# Altium footprint library Terminal_Blocks_Pluggable PCB_5.08mm.PcbLib: 299 footprints (part 14 of 19)
Each footprint in its own frame and in the unit in brackets; x right, y up, seen from the top. Pads: shape width x height; smd on the part's side, far side on the other; paste and mask are expansions set on the pad; w line width, h text height; cw(c..) or ccw(c..) is an arc to the next point about the centre after c.
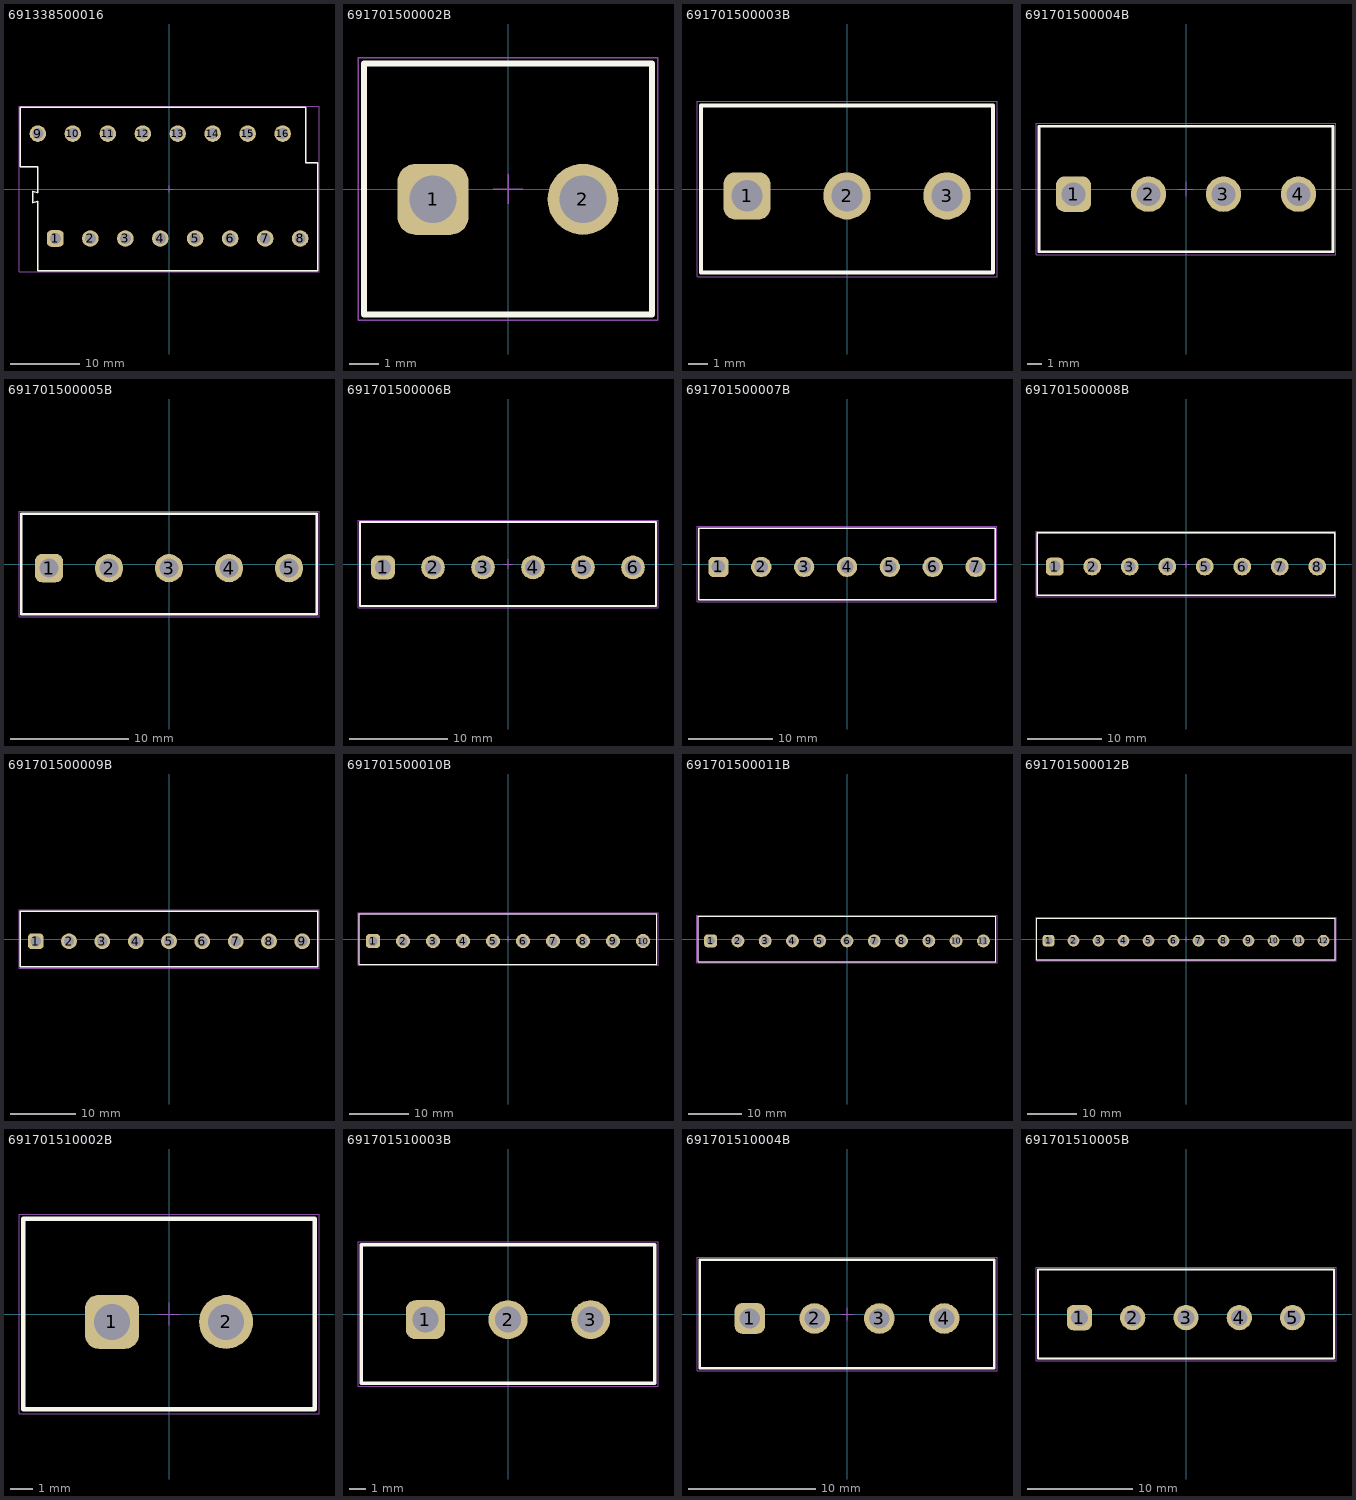
[diagram p13: the footprints below, top view; thin cyan lines are the x and y axes]

## 691338500016 [mm] "Double Level Vertical Male PCB Header, pitch 5.08mm, 16p"
height 22
pads (16):
  rrect50% 2.4x2.4 hole 1.6: 1(-16.51,-7.19)
  round 2.4 hole 1.6: 2(-11.43,-7.19) 3(-6.35,-7.19) 4(-1.27,-7.19) 5(3.81,-7.19) 6(8.89,-7.19) 7(13.97,-7.19) 8(19.05,-7.19) 9(-19.05,8.05) 10(-13.97,8.05) 11(-8.89,8.05) 12(-3.81,8.05) 13(1.27,8.05) 14(6.35,8.05) 15(11.43,8.05) 16(16.51,8.05)
Top Overlay:
  lines w0.2: -21.59,3.25 -21.59,11.85 19.85,11.85 19.85,3.8 21.59,3.8 21.59,-11.85 -19.05,-11.85 -19.05,-1.77 -19.8,-2.02 -19.8,-0.32 -19.05,-0.57 -19.05,3.25 -21.59,3.25
Top Designator:
  text ".Designator" at -7.498,-0.5 h1.5
Top Component Outline:
  lines w0.1: -21.59,3.25 -19.05,3.25 -19.05,-0.57 -19.8,-0.32 -19.8,-2.02 -19.05,-1.77 -19.05,-11.85 21.59,-11.85 21.59,3.8 19.85,3.8 19.85,11.85 -21.59,11.85 -21.59,3.25
Top 3D Body:
  lines w0.1: -21.59,3.25 -21.59,11.85 19.85,11.85 19.85,3.8 21.59,3.8 21.59,-11.85 -19.05,-11.85 -19.05,-1.77 -19.8,-2.02 -19.8,-0.32 -19.05,-0.57 -19.05,3.25 -21.59,3.25
Top Courtyard:
  lines w0.05: -21.79,-12.05 21.79,-12.05 21.79,12.05 -21.79,12.05 -21.79,-12.05
Top Component Center:
  lines w0.05: -0.5,0 0.5,0 ; 0,-0.5 0,0.5
3D body "691338500016.stp": height 22.1, standoff -3.8, extent -21.59,-11.85 21.59,11.85

## 691701500002B [mm] "THR - 5,08mm - PCB Vertical Open - 02p"
height 12
pads (2):
  rrect50% 2.4x2.4 hole 1.6: 1(-2.54,-0.35)
  round 2.4 hole 1.6: 2(2.54,-0.35)
Top Overlay:
  lines w0.2: -4.88,-4.25 -4.88,4.25 4.88,4.25 4.88,-4.25 -4.88,-4.25
Top Designator:
  text ".Designator" at -7.498,-0.5 h1.5
Top Component Outline:
  lines w0.1: -4.88,-4.25 4.88,-4.25 4.88,4.25 -4.88,4.25 -4.88,-4.25
Top 3D Body:
  lines w0.1: -4.88,-4.25 -4.88,4.25 4.88,4.25 4.88,-4.25 -4.88,-4.25
Top Courtyard:
  lines w0.05: -5.08,-4.45 -5.08,4.45 5.08,4.45 5.08,-4.45 -5.08,-4.45
Top Component Center:
  lines w0.05: -0.5,0 0.5,0 ; 0,-0.5 0,0.5
3D body "691701500002B.stp": height 12.05, standoff -2.55, extent -4.88,-4.25 4.88,4.25

## 691701500003B [mm] "THR - 5,08mm - PCB Vertical Open - 03p"
height 12
pads (3):
  rrect50% 2.4x2.4 hole 1.6: 1(-5.08,-0.35)
  round 2.4 hole 1.6: 2(0,-0.35) 3(5.08,-0.35)
Top Overlay:
  lines w0.2: -7.42,-4.25 -7.42,4.25 7.42,4.25 7.42,-4.25 -7.42,-4.25
Top Designator:
  text ".Designator" at -7.498,-0.5 h1.5
Top Component Outline:
  lines w0.1: -7.42,-4.25 7.42,-4.25 7.42,4.25 -7.42,4.25 -7.42,-4.25
Top 3D Body:
  lines w0.1: -7.42,-4.25 -7.42,4.25 7.42,4.25 7.42,-4.25 -7.42,-4.25
Top Courtyard:
  lines w0.05: -7.62,-4.45 -7.62,4.45 7.62,4.45 7.62,-4.45 -7.62,-4.45
Top Component Center:
  lines w0.05: -0.5,0 0.5,0 ; 0,-0.5 0,0.5
3D body "691701500003B.stp": height 12.05, standoff -2.55, extent -7.42,-4.25 7.42,4.25

## 691701500004B [mm] "THR - 5,08mm - PCB Vertical Open - 04p"
height 12
pads (4):
  rrect50% 2.4x2.4 hole 1.6: 1(-7.62,-0.35)
  round 2.4 hole 1.6: 2(-2.54,-0.35) 3(2.54,-0.35) 4(7.62,-0.35)
Top Overlay:
  lines w0.2: -9.96,-4.25 -9.96,4.25 9.96,4.25 9.96,-4.25 -9.96,-4.25
Top Designator:
  text ".Designator" at -7.498,-0.5 h1.5
Top Component Outline:
  lines w0.1: -9.96,-4.25 9.96,-4.25 9.96,4.25 -9.96,4.25 -9.96,-4.25
Top 3D Body:
  lines w0.1: -9.96,-4.25 -9.96,4.25 9.96,4.25 9.96,-4.25 -9.96,-4.25
Top Courtyard:
  lines w0.05: -10.16,-4.45 -10.16,4.45 10.16,4.45 10.16,-4.45 -10.16,-4.45
Top Component Center:
  lines w0.05: -0.5,0 0.5,0 ; 0,-0.5 0,0.5
3D body "691701500004B.stp": height 12.05, standoff -2.55, extent -9.96,-4.25 9.96,4.25

## 691701500005B [mm] "THR - 5,08mm - PCB Vertical Open - 05p"
height 12
pads (5):
  rrect50% 2.4x2.4 hole 1.6: 1(-10.16,-0.35)
  round 2.4 hole 1.6: 2(-5.08,-0.35) 3(0,-0.35) 4(5.08,-0.35) 5(10.16,-0.35)
Top Overlay:
  lines w0.2: -12.5,-4.25 12.5,-4.25 12.5,4.25 -12.5,4.25 -12.5,-4.25
Top Designator:
  text ".Designator" at -7.498,-0.5 h1.5
Top Component Outline:
  lines w0.1: -12.5,-4.25 -12.5,4.25 12.5,4.25 12.5,-4.25 -12.5,-4.25
Top 3D Body:
  lines w0.1: -12.5,-4.25 12.5,-4.25 12.5,4.25 -12.5,4.25 -12.5,-4.25
Top Courtyard:
  lines w0.05: -12.7,-4.45 12.7,-4.45 12.7,4.45 -12.7,4.45 -12.7,-4.45
Top Component Center:
  lines w0.05: -0.5,0 0.5,0 ; 0,-0.5 0,0.5
3D body "691701500005B.stp": height 12.05, standoff -2.55, extent -12.5,-4.25 12.5,4.25

## 691701500006B [mm] "THR - 5,08mm - PCB Vertical Open - 06p"
height 12
pads (6):
  rrect50% 2.4x2.4 hole 1.6: 1(-12.7,-0.35)
  round 2.4 hole 1.6: 2(-7.62,-0.35) 3(-2.54,-0.35) 4(2.54,-0.35) 5(7.62,-0.35) 6(12.7,-0.35)
Top Overlay:
  lines w0.2: -15.04,-4.25 15.04,-4.25 15.04,4.25 -15.04,4.25 -15.04,-4.25
Top Designator:
  text ".Designator" at -7.498,-0.5 h1.5
Top Component Outline:
  lines w0.1: -15.04,-4.25 -15.04,4.25 15.04,4.25 15.04,-4.25 -15.04,-4.25
Top 3D Body:
  lines w0.1: -15.04,-4.25 15.04,-4.25 15.04,4.25 -15.04,4.25 -15.04,-4.25
Top Courtyard:
  lines w0.05: -15.24,-4.45 15.24,-4.45 15.24,4.45 -15.24,4.45 -15.24,-4.45
Top Component Center:
  lines w0.05: -0.5,0 0.5,0 ; 0,-0.5 0,0.5
3D body "691701500006B.stp": height 12.05, standoff -2.55, extent -15.04,-4.25 15.04,4.25

## 691701500007B [mm] "THR - 5,08mm - PCB Vertical Open - 07p"
height 12
pads (7):
  rrect50% 2.4x2.4 hole 1.6: 1(-15.24,-0.35)
  round 2.4 hole 1.6: 2(-10.16,-0.35) 3(-5.08,-0.35) 4(0,-0.35) 5(5.08,-0.35) 6(10.16,-0.35) 7(15.24,-0.35)
Top Overlay:
  lines w0.2: -17.58,-4.25 17.58,-4.25 17.58,4.25 -17.58,4.25 -17.58,-4.25
Top Designator:
  text ".Designator" at -7.498,-0.5 h1.5
Top Component Outline:
  lines w0.1: -17.58,-4.25 -17.58,4.25 17.58,4.25 17.58,-4.25 -17.58,-4.25
Top 3D Body:
  lines w0.1: -17.58,-4.25 17.58,-4.25 17.58,4.25 -17.58,4.25 -17.58,-4.25
Top Courtyard:
  lines w0.05: -17.78,-4.45 17.78,-4.45 17.78,4.45 -17.78,4.45 -17.78,-4.45
Top Component Center:
  lines w0.05: -0.5,0 0.5,0 ; 0,-0.5 0,0.5
3D body "691701500007B.stp": height 12.05, standoff -2.55, extent -17.58,-4.25 17.58,4.25

## 691701500008B [mm] "THR - 5,08mm - PCB Vertical Open - 08p"
height 12
pads (8):
  rrect50% 2.4x2.4 hole 1.6: 1(-17.78,-0.35)
  round 2.4 hole 1.6: 2(-12.7,-0.35) 3(-7.62,-0.35) 4(-2.54,-0.35) 5(2.54,-0.35) 6(7.62,-0.35) 7(12.7,-0.35) 8(17.78,-0.35)
Top Overlay:
  lines w0.2: -20.12,-4.25 20.12,-4.25 20.12,4.25 -20.12,4.25 -20.12,-4.25
Top Designator:
  text ".Designator" at -7.498,-0.5 h1.5
Top Component Outline:
  lines w0.1: -20.12,-4.25 -20.12,4.25 20.12,4.25 20.12,-4.25 -20.12,-4.25
Top 3D Body:
  lines w0.1: -20.12,-4.25 20.12,-4.25 20.12,4.25 -20.12,4.25 -20.12,-4.25
Top Courtyard:
  lines w0.05: -20.32,-4.45 20.32,-4.45 20.32,4.45 -20.32,4.45 -20.32,-4.45
Top Component Center:
  lines w0.05: -0.5,0 0.5,0 ; 0,-0.5 0,0.5
3D body "691701500008B.stp": height 12.05, standoff -2.55, extent -20.12,-4.25 20.12,4.25

## 691701500009B [mm] "THR - 5,08mm - PCB Vertical Open - 09p"
height 12
pads (9):
  rrect50% 2.4x2.4 hole 1.6: 1(-20.32,-0.35)
  round 2.4 hole 1.6: 2(-15.24,-0.35) 3(-10.16,-0.35) 4(-5.08,-0.35) 5(0,-0.35) 6(5.08,-0.35) 7(10.16,-0.35) 8(15.24,-0.35) 9(20.32,-0.35)
Top Overlay:
  lines w0.2: -22.66,-4.25 22.66,-4.25 22.66,4.25 -22.66,4.25 -22.66,-4.25
Top Designator:
  text ".Designator" at -7.498,-0.5 h1.5
Top Component Outline:
  lines w0.1: -22.66,-4.25 -22.66,4.25 22.66,4.25 22.66,-4.25 -22.66,-4.25
Top 3D Body:
  lines w0.1: -22.66,-4.25 22.66,-4.25 22.66,4.25 -22.66,4.25 -22.66,-4.25
Top Courtyard:
  lines w0.05: -22.86,-4.45 22.86,-4.45 22.86,4.45 -22.86,4.45 -22.86,-4.45
Top Component Center:
  lines w0.05: -0.5,0 0.5,0 ; 0,-0.5 0,0.5
3D body "691701500009B.stp": height 12.05, standoff -2.55, extent -22.66,-4.25 22.66,4.25

## 691701500010B [mm] "THR - 5,08mm - PCB Vertical Open - 10p"
height 12
pads (10):
  rrect50% 2.4x2.4 hole 1.6: 1(-22.86,-0.35)
  round 2.4 hole 1.6: 2(-17.78,-0.35) 3(-12.7,-0.35) 4(-7.62,-0.35) 5(-2.54,-0.35) 6(2.54,-0.35) 7(7.62,-0.35) 8(12.7,-0.35) 9(17.78,-0.35) 10(22.86,-0.35)
Top Overlay:
  lines w0.2: -25.2,-4.25 25.2,-4.25 25.2,4.25 -25.2,4.25 -25.2,-4.25
Top Designator:
  text ".Designator" at -7.498,-0.5 h1.5
Top Component Outline:
  lines w0.1: -25.2,-4.25 -25.2,4.25 25.2,4.25 25.2,-4.25 -25.2,-4.25
Top 3D Body:
  lines w0.1: -25.2,-4.25 25.2,-4.25 25.2,4.25 -25.2,4.25 -25.2,-4.25
Top Courtyard:
  lines w0.05: -25.4,-4.45 25.4,-4.45 25.4,4.45 -25.4,4.45 -25.4,-4.45
Top Component Center:
  lines w0.05: -0.5,0 0.5,0 ; 0,-0.5 0,0.5
3D body "691701500010B.stp": height 12.05, standoff -2.55, extent -25.2,-4.25 25.2,4.25

## 691701500011B [mm] "THR - 5,08mm - PCB Vertical Open - 11p"
height 12
pads (11):
  rrect50% 2.4x2.4 hole 1.6: 1(-25.4,-0.35)
  round 2.4 hole 1.6: 2(-20.32,-0.35) 3(-15.24,-0.35) 4(-10.16,-0.35) 5(-5.08,-0.35) 6(0,-0.35) 7(5.08,-0.35) 8(10.16,-0.35) 9(15.24,-0.35) 10(20.32,-0.35) 11(25.4,-0.35)
Top Overlay:
  lines w0.2: -27.74,-4.25 27.74,-4.25 27.74,4.25 -27.74,4.25 -27.74,-4.25
Top Designator:
  text ".Designator" at -7.498,-0.5 h1.5
Top Component Outline:
  lines w0.1: -27.74,-4.25 -27.74,4.25 27.74,4.25 27.74,-4.25 -27.74,-4.25
Top 3D Body:
  lines w0.1: -27.74,-4.25 27.74,-4.25 27.74,4.25 -27.74,4.25 -27.74,-4.25
Top Courtyard:
  lines w0.05: -27.94,-4.45 27.94,-4.45 27.94,4.45 -27.94,4.45 -27.94,-4.45
Top Component Center:
  lines w0.05: -0.5,0 0.5,0 ; 0,-0.5 0,0.5
3D body "691701500011B.stp": height 12.05, standoff -2.55, extent -27.74,-4.25 27.74,4.25

## 691701500012B [mm] "THR - 5,08mm - PCB Vertical Open - 12p"
height 12
pads (12):
  rrect50% 2.4x2.4 hole 1.6: 1(-27.94,-0.35)
  round 2.4 hole 1.6: 2(-22.86,-0.35) 3(-17.78,-0.35) 4(-12.7,-0.35) 5(-7.62,-0.35) 6(-2.54,-0.35) 7(2.54,-0.35) 8(7.62,-0.35) 9(12.7,-0.35) 10(17.78,-0.35) 11(22.86,-0.35) 12(27.94,-0.35)
Top Overlay:
  lines w0.2: -30.28,-4.25 -30.28,4.25 30.28,4.25 30.28,-4.25 -30.28,-4.25
Top Designator:
  text ".Designator" at -7.498,-0.5 h1.5
Top Component Outline:
  lines w0.1: -30.28,-4.25 30.28,-4.25 30.28,4.25 -30.28,4.25 -30.28,-4.25
Top 3D Body:
  lines w0.1: -30.28,-4.25 -30.28,4.25 30.28,4.25 30.28,-4.25 -30.28,-4.25
Top Courtyard:
  lines w0.05: -30.48,-4.45 -30.48,4.45 30.48,4.45 30.48,-4.45 -30.48,-4.45
Top Component Center:
  lines w0.05: -0.5,0 0.5,0 ; 0,-0.5 0,0.5
3D body "691701500012B.stp": height 12.05, standoff -2.55, extent -30.28,-4.25 30.28,4.25

## 691701510002B [mm] "THR - 5,08mm - PCB Vertical Close - 02p"
height 12
pads (2):
  rrect50% 2.4x2.4 hole 1.6: 1(-2.54,-0.35)
  round 2.4 hole 1.6: 2(2.54,-0.35)
Top Overlay:
  lines w0.2: -6.48,-4.25 -6.48,4.25 6.48,4.25 6.48,-4.25 -6.48,-4.25
Top Designator:
  text ".Designator" at -7.498,-0.5 h1.5
Top Component Outline:
  lines w0.1: -6.48,-4.25 6.48,-4.25 6.48,4.25 -6.48,4.25 -6.48,-4.25
Top 3D Body:
  lines w0.1: -6.48,-4.25 -6.48,4.25 6.48,4.25 6.48,-4.25 -6.48,-4.25
Top Courtyard:
  lines w0.05: -6.68,-4.45 -6.68,4.45 6.68,4.45 6.68,-4.45 -6.68,-4.45
Top Component Center:
  lines w0.05: -0.5,0 0.5,0 ; 0,-0.5 0,0.5
3D body "691701510002B.stp": height 12.1, standoff -2.5, extent -6.48,-4.25 6.48,4.25

## 691701510003B [mm] "THR - 5,08mm - PCB Vertical Close - 03p"
height 12
pads (3):
  rrect50% 2.4x2.4 hole 1.6: 1(-5.08,-0.35)
  round 2.4 hole 1.6: 2(0,-0.35) 3(5.08,-0.35)
Top Overlay:
  lines w0.2: -9.02,-4.25 9.02,-4.25 9.02,4.25 -9.02,4.25 -9.02,-4.25
Top Designator:
  text ".Designator" at -7.498,-0.5 h1.5
Top Component Outline:
  lines w0.1: -9.02,-4.25 -9.02,4.25 9.02,4.25 9.02,-4.25 -9.02,-4.25
Top 3D Body:
  lines w0.1: -9.02,-4.25 9.02,-4.25 9.02,4.25 -9.02,4.25 -9.02,-4.25
Top Courtyard:
  lines w0.05: -9.22,-4.45 9.22,-4.45 9.22,4.45 -9.22,4.45 -9.22,-4.45
Top Component Center:
  lines w0.05: -0.5,0 0.5,0 ; 0,-0.5 0,0.5
3D body "691701510003B.stp": height 12.1, standoff -2.5, extent -9.02,-4.25 9.02,4.25

## 691701510004B [mm] "THR - 5,08mm - PCB Vertical Close - 04p"
height 12
pads (4):
  rrect50% 2.4x2.4 hole 1.6: 1(-7.62,-0.35)
  round 2.4 hole 1.6: 2(-2.54,-0.35) 3(2.54,-0.35) 4(7.62,-0.35)
Top Overlay:
  lines w0.2: -11.56,-4.25 -11.56,4.25 11.56,4.25 11.56,-4.25 -11.56,-4.25
Top Designator:
  text ".Designator" at -7.498,-0.5 h1.5
Top Component Outline:
  lines w0.1: -11.56,-4.25 11.56,-4.25 11.56,4.25 -11.56,4.25 -11.56,-4.25
Top 3D Body:
  lines w0.1: -11.56,-4.25 -11.56,4.25 11.56,4.25 11.56,-4.25 -11.56,-4.25
Top Courtyard:
  lines w0.05: -11.76,-4.45 -11.76,4.45 11.76,4.45 11.76,-4.45 -11.76,-4.45
Top Component Center:
  lines w0.05: -0.5,0 0.5,0 ; 0,-0.5 0,0.5
3D body "691701510004B.stp": height 12.1, standoff -2.5, extent -11.56,-4.25 11.56,4.25

## 691701510005B [mm] "THR - 5,08mm - PCB Vertical Close - 05p"
height 12
pads (5):
  rrect50% 2.4x2.4 hole 1.6: 1(-10.16,-0.35)
  round 2.4 hole 1.6: 2(-5.08,-0.35) 3(0,-0.35) 4(5.08,-0.35) 5(10.16,-0.35)
Top Overlay:
  lines w0.2: -14.1,-4.25 -14.1,4.25 14.1,4.25 14.1,-4.25 -14.1,-4.25
Top Designator:
  text ".Designator" at -7.498,-0.5 h1.5
Top Component Outline:
  lines w0.1: -14.1,-4.25 14.1,-4.25 14.1,4.25 -14.1,4.25 -14.1,-4.25
Top 3D Body:
  lines w0.1: -14.1,-4.25 -14.1,4.25 14.1,4.25 14.1,-4.25 -14.1,-4.25
Top Courtyard:
  lines w0.05: -14.3,-4.45 -14.3,4.45 14.3,4.45 14.3,-4.45 -14.3,-4.45
Top Component Center:
  lines w0.05: -0.5,0 0.5,0 ; 0,-0.5 0,0.5
3D body "691701510005B.stp": height 12.1, standoff -2.5, extent -14.1,-4.25 14.1,4.25